# Altium schematic symbol library Schlib222.SchLib: 2 symbols
Pins are listed as number, name and electrical type; pins without a type are passive.

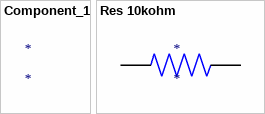
[diagram p0: symbols Component_1 to Res 10kohm]

## Component_1
designator *
footprint RESAD640W45L370D200

## Res 10kohm
designator *
footprint RESC2012X65N